# Altium schematic symbol library JST_Terminal.SchLib: 236 symbols (part 1 of 5)
Pins are listed as number, name and electrical type; pins without a type are passive.

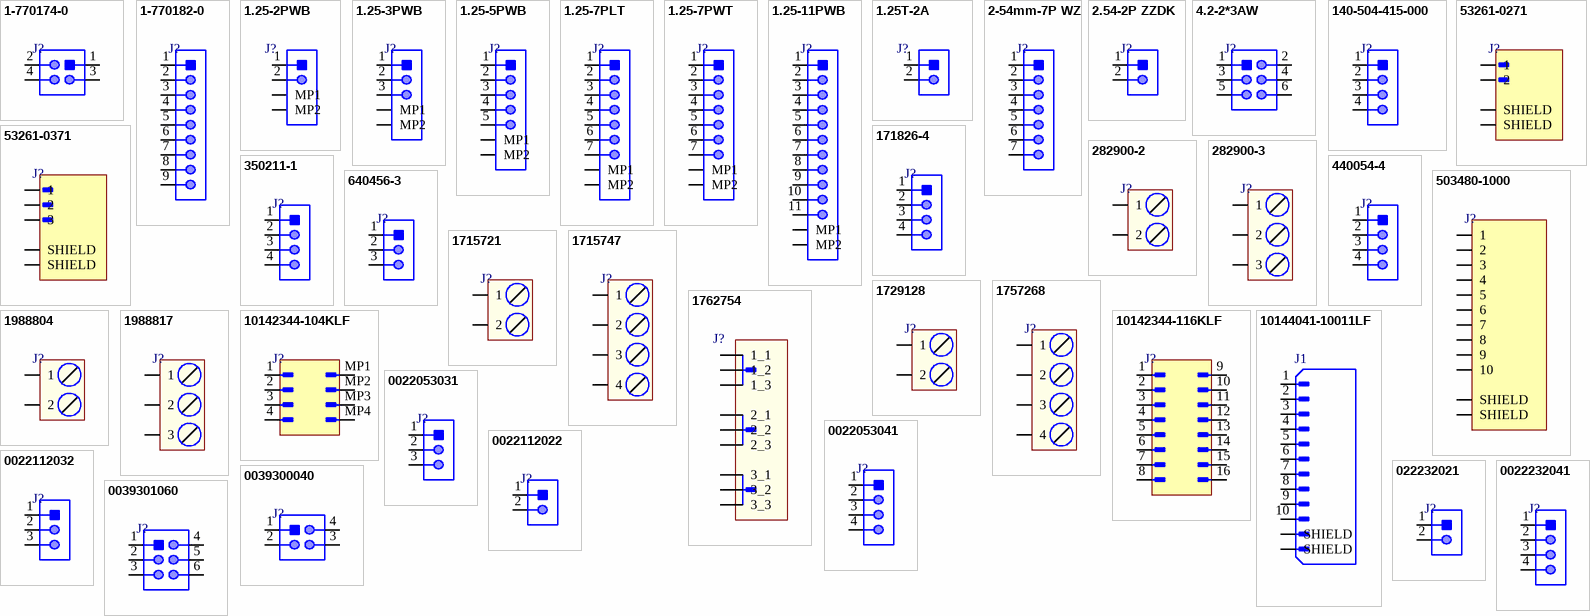
[diagram p0: symbols 1-770174-0 to 0039301060]

## 1-770174-0
designator J?
CONN HEADER VERT 4POS 4.14MM; Manufacturer: TE Connectivity; Manufacturer Part Number: 1-770174-0; Item Type: Power Connectors; Supplier: Future Electronics; Supplier Part Number: 3310547; RoHS: Yes; Stock: 890; Pricing: 1=0.995, 30=1.04, 40=0.945, 125=0.91, 300=0.95, 400=0.87, 1250=0.8 (USD); ComponentLink1URL: https://datasheet.ciiva.com/19460/746478-19460823.pdf?src-supplier=Jameco; ComponentLink1Description: https://datasheet.ciiva.com/19460/746478-19460823.pdf?src-supplier=Jameco; ComponentLink2URL: https://datasheet.ciiva.com/11755/0900766b80b8608c-11755178.pdf?src-supplier=Rs; ComponentLink2Description: https://datasheet.ciiva.com/11755/0900766b80b8608c-11755178.pdf?src-supplier=Rs; ComponentLink3URL: https://datasheet.ciiva.com/16324/eng-cs-82181-softshell-high-density-0508-16324224.pdf?src-supplier=Future+Electronics; ComponentLink3Description: https://datasheet.ciiva.com/16324/eng-cs-82181-softshell-high-density-0508-16324224.pdf?src-supplier=Future+Electronics; ComponentLink4URL: https://datasheet.ciiva.com/1111/eng-cd-770174-l2-1111782.pdf?src-supplier=Element14; ComponentLink4Description: https://datasheet.ciiva.com/1111/eng-cd-770174-l2-1111782.pdf?src-supplier=Element14; ComponentLink5URL: https://datasheet.ciiva.com/15173/getdatasheetpartid-47574-15173655.pdf?src-supplier=Verical; ComponentLink5Description: https://datasheet.ciiva.com/15173/getdatasheetpartid-47574-15173655.pdf?src-supplier=Verical; ComponentLink6URL: https://datasheet.ciiva.com/710/eng-cd-770174-m-710026.pdf?src-supplier=Digikey; ComponentLink6Description: https://datasheet.ciiva.com/710/eng-cd-770174-m-710026.pdf?src-supplier=Digikey; ComponentLink7URL: https://datasheet.ciiva.com/3126/eng-cs-82181-softshell-high-density-0408-3126092.pdf?src-supplier=Avnet; ComponentLink7Description: https://datasheet.ciiva.com/3126/eng-cs-82181-softshell-high-density-0408-3126092.pdf?src-supplier=Avnet; ComponentLink8URL: https://datasheet.ciiva.com/30189/eng-cs-82181-softshell-high-density-0508-30189644.pdf?src-supplier=Onlinecomponents.com; ComponentLink8Description: https://datasheet.ciiva.com/30189/eng-cs-82181-softshell-high-density-0508-30189644.pdf?src-supplier=Onlinecomponents.com; ComponentLink9URL: https://datasheet.ciiva.com/29266/745091-da-01-en-4-pol-mini-univ-mate-n-lok-stecksockel-29266107.pdf?src-supplier=Conrad; ComponentLink9Description: https://datasheet.ciiva.com/29266/745091-da-01-en-4-pol-mini-univ-mate-n-lok-stecksockel-29266107.pdf?src-supplier=Conrad
footprint 1-770174-0
pins: 1, 2, 3, 4

## 1-770182-0
designator J?
CONN HEADER VERT 9POS 4.14MM; Manufacturer: TE Connectivity; Manufacturer Part Number: 1-770182-0; Item Type: Power Connectors; Supplier: Future Electronics; LCSC Part Number: C3151769; RoHS: Yes; Stock: 4602; Pricing: 1=1.17, 30=1.14, 125=1.1, 300=1.08, 1250=1.03 (USD); ComponentLink1URL: https://datasheet.ciiva.com/714/eng-cd-770182-l1-714801.pdf?src-supplier=Farnell; ComponentLink1Description: https://datasheet.ciiva.com/714/eng-cd-770182-l1-714801.pdf?src-supplier=Farnell; ComponentLink2URL: https://datasheet.ciiva.com/11755/0900766b80b8608c-11755213.pdf?src-supplier=Rs; ComponentLink2Description: https://datasheet.ciiva.com/11755/0900766b80b8608c-11755213.pdf?src-supplier=Rs; ComponentLink3URL: https://datasheet.ciiva.com/16222/eng-cs-82181-softshell-high-density-0508-16222388.pdf?src-supplier=Future+Electronics; ComponentLink3Description: https://datasheet.ciiva.com/16222/eng-cs-82181-softshell-high-density-0508-16222388.pdf?src-supplier=Future+Electronics; ComponentLink4URL: https://datasheet.ciiva.com/19460/892141-19460018.pdf?src-supplier=Jameco; ComponentLink4Description: https://datasheet.ciiva.com/19460/892141-19460018.pdf?src-supplier=Jameco; ComponentLink5URL: https://datasheet.ciiva.com/41446/001231547-da-01-en-stiftsockel-180grad-1-0770182-0-41446360.pdf?src-supplier=Conrad; ComponentLink5Description: https://datasheet.ciiva.com/41446/001231547-da-01-en-stiftsockel-180grad-1-0770182-0-41446360.pdf?src-supplier=Conrad; ComponentLink6URL: https://datasheet.ciiva.com/14154/770182-eng-datasheet-14154870.pdf?src-supplier=Distrelec; ComponentLink6Description: https://datasheet.ciiva.com/14154/770182-eng-datasheet-14154870.pdf?src-supplier=Distrelec; ComponentLink7URL: https://datasheet.ciiva.com/1111/1648474-1111785.pdf?src-supplier=Element14; ComponentLink7Description: https://datasheet.ciiva.com/1111/1648474-1111785.pdf?src-supplier=Element14; ComponentLink8URL: https://datasheet.ciiva.com/15173/getdatasheetpartid-92655-15173754.pdf?src-supplier=Verical; ComponentLink8Description: https://datasheet.ciiva.com/15173/getdatasheetpartid-92655-15173754.pdf?src-supplier=Verical; ComponentLink9URL: https://datasheet.ciiva.com/3126/eng-cs-82181-softshell-high-density-0408-3126095.pdf?src-supplier=Avnet; ComponentLink9Description: https://datasheet.ciiva.com/3126/eng-cs-82181-softshell-high-density-0408-3126095.pdf?src-supplier=Avnet; ComponentLink10URL: https://datasheet.ciiva.com/30155/eng-cs-82181-softshell-high-density-0508-30155467.pdf?src-supplier=Onlinecomponents.com; ComponentLink10Description: https://datasheet.ciiva.com/30155/eng-cs-82181-softshell-high-density-0508-30155467.pdf?src-supplier=Onlinecomponents.com
footprint 1-770182-0
pins: 1, 2, 3, 4, 5, 6, 7, 8, 9

## 1.25-2PWB
designator J?
1x2P 1 1.25mm Male pin 2 -40℃~+85℃ Surface Mount SMD,P=1.25mm Wire To Board / Wire To Wire Connector ROHS; Manufacturer: DEALON; Manufacturer Part Number: 1.25-2PWB; Item Type: JST Connector; Package: SMD,P=1.25mm; LCSC Part Number: C2905009; ComponentLink1Description: LCSC; ComponentLink1URL: https://www.lcsc.com/product-detail/Wire-To-Board-Wire-To-Wire-Connector_DEALON-1-25-2PWB_C2905009.html
footprint 1.25-2PWB
pins: 1, 2, MP1, MP2

## 1.25-3PWB
designator J?
1x3P 1 1.25mm Male pin 3 -40℃~+85℃ Surface Mount SMD,P=1.25mm Wire To Board / Wire To Wire Connector ROHS; Manufacturer: DEALON; Manufacturer Part Number: 1.25-3PWB; Item Type: Right Angle JST; ComponentLink1Description: LCSC; ComponentLink1URL: https://www.lcsc.com/product-detail/Wire-To-Board-Wire-To-Wire-Connector_DEALON-1-25-3PWB_C2905010.html; Package: Custom; LCSC Part Number: C2905010
footprint 1.25-3PWB
pins: 1, 2, 3, MP1, MP2

## 1.25-5PWB
designator J?
1x5P 1 1.25mm Male pin 5 -25℃~+85℃ Surface Mount SMD,P=1.25mm Wire To Board / Wire To Wire Connector ROHS; Manufacturer: DEALON; Manufacturer Part Number: 1.25-5PWB; Item Type: JST Right Angle; Package: SMD,P=1.25mm; LCSC Part Number: C2905012; ComponentLink1Description: LCSC; ComponentLink1URL: https://www.lcsc.com/product-detail/Wire-To-Board-Wire-To-Wire-Connector_DEALON-1-25-5PWB_C2905012.html
footprint 1.25-5PWB
pins: 1, 2, 3, 4, 5, MP1, MP2

## 1.25-7PLT
designator J?
1x7P 7P 1 Tin 1.25mm 7 -25℃~+85℃ 1A Brass Standing paste SMD,P=1.25mm Wire To Board Connector ROHS; Manufacturer: FG; Manufacturer Part Number: 1.25-7PLT; Package: SMD,P=1.25mm; LCSC Part Number: C2763644; Item Type: Wire To Board Connector; ComponentLink1Description: LCSC; ComponentLink1URL: https://www.lcsc.com/product-detail/Wire-To-Board-Connector_FG-1-25-7PLT_C2763644.html?s_z=n_1.25-7P
footprint 1.25-7PLT
pins: 1, 2, 3, 4, 5, 6, 7, MP1, MP2

## 1.25-7PWT
designator J?
SMD,P=1.25mm,Surface Mount，Right Angle; Manufacturer: FG; Manufacturer Part Number: 1.25-7PWT; Item Type: Wire to Board Connector; Package: SMD,P=1.25mm,Surface Mount，Right Angle; LCSC Part Number: C2763635; ComponentLink1Description: LCSC; ComponentLink1URL: https://www.lcsc.com/product-detail/Wire-To-Board-Connector_FG-1-25-7PWT_C2763635.html?s_z=n_1.25-7P
footprint 1.25-7PWT
pins: 1, 2, 3, 4, 5, 6, 7, MP1, MP2

## 1.25-11PWB
designator J?
SMD,P=1.25mm Wire To Board / Wire To Wire Connector ROHS; Manufacturer: DEALON; Manufacturer Part Number: 1.25-11PWB; Item Type: Wire To Board Connector; Package: SMD,P=1.25mm; LCSC Part Number: C5140428; ComponentLink1Description: LCSC; ComponentLink1URL: https://www.lcsc.com/product-detail/Wire-To-Board-Wire-To-Wire-Connector_DEALON-1-25-11PWB_C5140428.html
footprint 1.25-11PWB
pins: 1, 2, 3, 4, 5, 6, 7, 8, 9, 10, 11, MP1, MP2

## 1.25T-2A
designator J?
0.049"(1.25mm) 2 MalePin Header MX1.25 Through Hole Wire To Board / Wire To Wire Connector ROHS; Manufacturer: BOOMELE; Manufacturer Part Number: 1.25T-2A; Package: Custom; ComponentLink1Description: LCSC; ComponentLink1URL: https://lcsc.com/product-detail/Wire-To-Board-Wire-To-Wire-Connector_BOOMELE-Boom-Precision-Elec-1-25T-2A_C10819.html; LCSC Part Number: C10819; Item Type: Header
footprint 1.25T-2A_
pins: 1, 2

## 2-54mm-7P WZ
designator J?
1x7P 7P 1 XH Tin 2.54mm 2.54mm 7 -25℃~+85℃ Brass 3A Bend-in Push-Pull,P=2.5mm Wire To Board Connector ROHS; Manufacturer: SHOU HAN; Manufacturer Part Number: 2.54mm-7P WZ; Package: Push-Pull,P=2.5mm; LCSC Part Number: C5368793; Item Type: Wire To Board Connector; ComponentLink1Description: LCSC; ComponentLink1URL: https://www.lcsc.com/product-detail/Wire-To-Board-Connector_SHOU-HAN-2-54mm-7P-WZ_C5368793.html
footprint 2.54mm-7P WZ
pins: 1, 2, 3, 4, 5, 6, 7

## 2.54-2P ZZDK
designator J?
1x2P 2P XH 1 2.5mm Tin 2 -25℃~+85℃ Brass 3A Direct Insert Plugin,P=2.5mm Wire To Board Connector ROHS; Manufacturer: SHOU HAN; Manufacturer Part Number: 2.54-2P ZZDK; Package: Plugin,P=2.5mm; LCSC Part Number: C18185649; Item Type: Wire To Board Connector; ComponentLink1Description: LCSC; ComponentLink1URL: https://www.lcsc.com/product-detail/Wire-To-Board-Connector_SHOU-HAN-2-54-2P-ZZDK_C18185649.html
footprint 2.54-2P ZZDK
pins: 1, 2

## 4.2-2*3AW
designator J?
4.2mm Wire To Board Connector ROHS; Manufacturer: BOOMELE; Manufacturer Part Number: 4.2-2*3AW; Package: Custom; LCSC Part Number: C35447; Item Type: Wire To Board Connector; ComponentLink1Description: LCSC; ComponentLink1URL: https://jlcpcb.com/partdetail/boomele_boom_Precision_elec-4_2_23AW/C35447
footprint 4.2-2*3AW
pins: 1, 2, 3, 4, 5, 6

## 140-504-415-000
designator J?
2.0MM PITCH CONNECTOR WITH 4 P.C; Manufacturer: EDAC; Manufacturer Part Number: 140-504-415-000; Item Type: JST Connector; Supplier 1: Digi-Key; RoHS: No; Category: Connectors; Stock 1: 4727; Pricing 1: 1=0.17000, 10=0.14200, 25=0.12600, 50=0.11760, 100=0.10920, 250=0.09660, 500=0.09240, 1000=0.07560, 2500=0.06930 (USD); Supplier Part Number 1: 151-140-504-415-000-ND
footprint 140-504-415-000_
pins: 1, 2, 3, 4

## 53261-0271
designator J?
CONN HEADER SMD R/A 2POS 1.25MM; Manufacturer: Molex; Manufacturer Part Number: 53261-0271; Item Type: Headers and Wire Housings; Plating: Tin; Contact Resistance: 20mR; Number of Contacts: 2; Voltage Rating: 125V; Current Rating: 1A; Insulation Resistance: 100MR; Gender: Male; Glow Wire Compliant: Non-compliant; Supplier: Arrow Electronics; LCSC Part Number: C177225; RoHS: Yes; Stock: 107200; Pricing: 1000=0.4221, 2000=0.4184, 3000=0.4147, 4000=0.411, 5000=0.4073, 10000=0.4035 (USD); Mounting Technology: Surface Mount; Contact Material: Bronze,Tin; Contact Plating: Tin; Color: Beige; Housing Material: Nylon; Contact Shape: Rectangular; Contact Finish - Mating: TIN; Insulation Material: Nylon; Insulation Color: Natural; Housing Color: Natural; Min Operating Temperature: -40°C; Max Operating Temperature: 85°C; Termination: Solder; Orientation: Right Angle; Number of Rows: 1; Voltage Rating (AC): 125V; Package Quantity: 1000; Packaging: Tape and Reel; Number of Positions: 2; Working Voltage: 125V; Number of Circuits: 2; Voltage Rating (DC): 125V; Connector Type: Header; Fastening Type: Detent; Series: PicoBlade; Contact Type: Blade Pin; Pitch: 1.25mm; Lead Pitch: 1.25mm; Depth: 5.2mm; Radiation Hardening: No; Lead Free: Lead Free; Flammability Rating: UL94 V-0; RoHS Compliant: Yes; Reach SVHC Compliant: Unknown; ComponentLink1URL: https://datasheet.ciiva.com/7167/1626147-7167496.pdf?src-supplier=Newark; ComponentLink1Description: https://datasheet.ciiva.com/7167/1626147-7167496.pdf?src-supplier=Newark; ComponentLink2URL: https://datasheet.ciiva.com/34303/1932547-34303342.pdf?src-supplier=Jameco; ComponentLink2Description: https://datasheet.ciiva.com/34303/1932547-34303342.pdf?src-supplier=Jameco; ComponentLink3URL: https://datasheet.ciiva.com/7920/1887027-7920826.pdf?src-supplier=Element14; ComponentLink3Description: https://datasheet.ciiva.com/7920/1887027-7920826.pdf?src-supplier=Element14; ComponentLink4URL: https://datasheet.ciiva.com/22683/1626147-22683562.pdf?src-supplier=Element14; ComponentLink4Description: https://datasheet.ciiva.com/22683/1626147-22683562.pdf?src-supplier=Element14; ComponentLink5URL: https://datasheet.ciiva.com/46393/1808526-46393547.pdf?src-supplier=Element14; ComponentLink5Description: https://datasheet.ciiva.com/46393/1808526-46393547.pdf?src-supplier=Element14
footprint 0532610271
pins: 1, 2, SH1 SHIELD, SH2 SHIELD

## 53261-0371
designator J?
CONN HEADER SMD R/A 3POS 1.25MM; Manufacturer: Molex; Manufacturer Part Number: 53261-0371; Manufacturer Series: 53261; Item Type: Headers and Wire Housings; Plating: Tin; Number of Positions: 3; Gender: Male; Contact Resistance: 20mR; Option: General Purpose; Current Rating: 1A; Voltage Rating: 125V; Mixed Contacts: No; Number of Rows Loaded: 1; Insulation Resistance: 100MR; Number of Circuits: 2; Glow Wire Compliant: Non-compliant; Supplier: Arrow Electronics; LCSC Part Number: C293630; RoHS: Yes; Stock: 442600; Pricing: 1600=0.3964 (USD); Mounting Technology: Surface Mount,Board; Contact Plating: Tin; Contact Material: Bronze,Tin; Color: Natural; Housing Color: Natural; Housing Material: Nylon; Min Operating Temperature: -40°C; Max Operating Temperature: 85°C; Termination: Solder; Orientation: Right Angle; Number of Rows: 1; Packaging: Tape and Reel; Number of Contacts: 3; Series: PicoBlade; Contact Type: Blade Pin; Contact Gender: Male; Mounting Style: STRAIGHT; Filter Feature: No; Voltage Rating (AC): 125V; Working Voltage: 125V; Voltage Rating (DC): 125V; Length: 8.9mm; Pitch: 1.25mm; Depth: 5.2mm; Radiation Hardening: No; Flammability Rating: UL94 V-0; MIL Conformance: No; DIN Conformance: No; IEC Conformance: No; RoHS Compliant: Yes; Reach SVHC Compliant: Unknown; Lead Free: Lead Free; ComponentLink1URL: https://datasheet.ciiva.com/3932/333250532610371-pcb-headers-3932824.pdf?src-supplier=Arrow+Electronics; ComponentLink1Description: https://datasheet.ciiva.com/3932/333250532610371-pcb-headers-3932824.pdf?src-supplier=Arrow+Electronics; ComponentLink2URL: https://datasheet.ciiva.com/34302/1302094-34302177.pdf?src-supplier=Jameco; ComponentLink2Description: https://datasheet.ciiva.com/34302/1302094-34302177.pdf?src-supplier=Jameco
footprint 53261-0371
pins: 1, 2, 3, SH1 SHIELD, SH2 SHIELD

## 171826-4
designator J?
CONN HEADER R/A 4POS 2.5MM; Manufacturer: TE Connectivity; Manufacturer Part Number: 171826-4; Number of Contacts: 4; Connector Type: Plug,Header,Pin; PCB Mount Retention: Without; PCB Mounting Orientation: Horizontal; Backwall/Post Interruptions: No (Without); Mating Alignment: Yes (With); Contact Current Rating: 3.5A; Plating Thickness: 0.8um; PCB Thickness: 0.063inch; Tail Length: 0.142inch; Approvals: UL; Item Type: R/A Header; Supplier 1: Digi-Key; Stock 1: 8314; Pricing 1: 1=0.65, 10=0.605, 100=0.4642, 500=0.40362, 1000=0.33298, 5000=0.29262, 10000=0.27244 (USD); Mount: Through Hole; Contact Plating: Copper,Tin; Contact Material: Brass; Color: Natural; Housing Color: Natural; Housing Material: Nylon; Contact Shape: Square; Insulation Material: Polyamide; Min Operating Temperature: -20°C; Max Operating Temperature: 95°C; Number of Rows: 1; Termination: Solder; Packaging: Bag; Package Quantity: 500; Number of Positions: 4; Orientation: Right Angle; Series: EI; Contact Type: Male Pin; Contact Retention: No (Without); Mating Retention: Yes (With); PCB Mount Alignment: No (Without); Strain Relief: No (Without); Contact Gender: Male; Current Rating: 3.5A; Length: 10mm; Width: 13.5mm; Height: 0.264inch; Pitch: 2.5mm; Contact Mating Length: 7.5mm; Depth: 13.5mm; Lead Pitch: 2.5mm; Radiation Hardening: No; Flammability Rating: UL94 V-0; RoHS Compliant: Yes; REACH SVHC: No SVHC; ComponentLink1URL: http://www.farnell.com/datasheets/1322337.pdf?src-supplier=Element14; ComponentLink1Description: http://www.farnell.com/datasheets/1322337.pdf?src-supplier=Element14; ComponentLink2URL: http://www.te.com/commerce/DocumentDelivery/DDEController?Action=srchrtrv&DocNm=171826&DocType=Customer+Drawing&DocLang=English&src-supplier=Digi-Key; ComponentLink2Description: http://www.te.com/commerce/DocumentDelivery/DDEController?Action=srchrtrv&DocNm=171826&DocType=Customer+Drawing&DocLang=English&src-supplier=Digi-Key; ComponentLink3URL: http://www.onlinecomponents.com/productFiles/mf-AMP/eng_cat_1242174_0698_10_.pdf?src-supplier=Onlinecomponents.com; ComponentLink3Description: http://www.onlinecomponents.com/productFiles/mf-AMP/eng_cat_1242174_0698_10_.pdf?src-supplier=Onlinecomponents.com; ComponentLink4URL: http://uk.rs-online.com/webdocs/0d92/0900766b80d92f49.pdf?src-supplier=RSComponents; ComponentLink4Description: http://uk.rs-online.com/webdocs/0d92/0900766b80d92f49.pdf?src-supplier=RSComponents; ComponentLink5URL: http://www.jameco.com/Jameco/Products/ProdDS/742320.pdf?src-supplier=Jameco; ComponentLink5Description: http://www.jameco.com/Jameco/Products/ProdDS/742320.pdf?src-supplier=Jameco; Supplier Part Number 1: A112643-ND; LCSC Part Number: C590635
footprint 171826-4_
pins: 1, 2, 3, 4

## 282900-2
designator J?
TERM BLK 2POS SIDE ENTRY 5MM PCB; Manufacturer: TE Connectivity; Manufacturer Part Number: 282900-2; Item Type: Terminal Blocks; Supplier: Digikey; Supplier Part Number: A113335-ND; RoHS: Yes; Stock: 978; Pricing: 1=1.06, 10=0.968, 25=0.9392, 50=0.9298, 100=0.863, 250=0.84872, 500=0.83944 (USD); ComponentLink1URL: https://datasheet.ciiva.com/824/eng-cd-282900-c6-824433.pdf?src-supplier=Digikey; ComponentLink1Description: https://datasheet.ciiva.com/824/eng-cd-282900-c6-824433.pdf?src-supplier=Digikey; ComponentLink2URL: https://datasheet.ciiva.com/18620/eng-cd-282900-c6-18620923.pdf?src-supplier=Digikey; ComponentLink2Description: https://datasheet.ciiva.com/18620/eng-cd-282900-c6-18620923.pdf?src-supplier=Digikey
footprint 282900-2
pins: 1, 2

## 282900-3
designator J?
TERM BLK 3POS SIDE ENTRY 5MM PCB; Manufacturer: TE Connectivity; Manufacturer Part Number: 282900-3; Item Type: Terminal Blocks; Supplier: Digikey; Supplier Part Number: A113336-ND; RoHS: Yes; Stock: 1182; Pricing: 1=2.07, 10=1.843, 25=1.8336, 50=1.815, 175=1.6556 (USD); ComponentLink1URL: https://datasheet.ciiva.com/824/eng-cd-282900-c6-824539.pdf?src-supplier=Digikey; ComponentLink1Description: https://datasheet.ciiva.com/824/eng-cd-282900-c6-824539.pdf?src-supplier=Digikey; ComponentLink2URL: https://datasheet.ciiva.com/18620/eng-cd-282900-c6-18620942.pdf?src-supplier=Digikey; ComponentLink2Description: https://datasheet.ciiva.com/18620/eng-cd-282900-c6-18620942.pdf?src-supplier=Digikey; ComponentLink3URL: https://datasheet.ciiva.com/9371/eng-cs-1308389-eurostyle-terminal-blocks-0607-9371157.pdf?src-supplier=Avnet; ComponentLink3Description: https://datasheet.ciiva.com/9371/eng-cs-1308389-eurostyle-terminal-blocks-0607-9371157.pdf?src-supplier=Avnet
footprint 282900-3
pins: 1, 2, 3

## 350211-1
designator J?
CONN HEADER VERT 4POS 5.08MM; Manufacturer: TE Connectivity; Manufacturer Part Number: 350211-1; Item Type: Power Connectors; Contact Style: 4753ConnectorType; Operating Supply Voltage: 250V; Supplier: Future Electronics; LCSC Part Number: C305826; RoHS: Yes; Stock: 3; Pricing: 1=0.795, 50=0.765, 150=0.735, 500=0.705, 1500=0.65 (USD); ComponentLink1URL: https://datasheet.ciiva.com/19454/421358-19454101.pdf?src-supplier=Jameco; ComponentLink1Description: https://datasheet.ciiva.com/19454/421358-19454101.pdf?src-supplier=Jameco; ComponentLink2URL: https://datasheet.ciiva.com/15173/getdatasheetpartid-92383-15173751.pdf?src-supplier=Verical; ComponentLink2Description: https://datasheet.ciiva.com/15173/getdatasheetpartid-92383-15173751.pdf?src-supplier=Verical; ComponentLink3URL: https://datasheet.ciiva.com/11755/0900766b800c5727-11755181.pdf?src-supplier=Rs; ComponentLink3Description: https://datasheet.ciiva.com/11755/0900766b800c5727-11755181.pdf?src-supplier=Rs; ComponentLink4URL: https://datasheet.ciiva.com/1442/1698836-1442676.pdf?src-supplier=Element14; ComponentLink4Description: https://datasheet.ciiva.com/1442/1698836-1442676.pdf?src-supplier=Element14; ComponentLink5URL: https://datasheet.ciiva.com/3126/eng-cs-82181-softshell-standard-density-0508-3126153.pdf?src-supplier=Avnet; ComponentLink5Description: https://datasheet.ciiva.com/3126/eng-cs-82181-softshell-standard-density-0508-3126153.pdf?src-supplier=Avnet; ComponentLink6URL: https://datasheet.ciiva.com/14154/cs-82181-soft-shell-eng-14154757.pdf?src-supplier=Distrelec; ComponentLink6Description: https://datasheet.ciiva.com/14154/cs-82181-soft-shell-eng-14154757.pdf?src-supplier=Distrelec; ComponentLink7URL: https://datasheet.ciiva.com/30161/eng-cs-82181-softshell-standard-density-0508-30161246.pdf?src-supplier=Onlinecomponents.com; ComponentLink7Description: https://datasheet.ciiva.com/30161/eng-cs-82181-softshell-standard-density-0508-30161246.pdf?src-supplier=Onlinecomponents.com
footprint 350211-1
pins: 1, 2, 3, 4

## 440054-4
designator J?
CONN HEADER VERT 4POS 2MM; Manufacturer: TE Connectivity; Manufacturer Part Number: 440054-4; Item Type: JST Connector; Supplier 1: Rs; RoHS: Yes; Category: Headers and Wire Housings; Stock 1: 3450; Pricing 1: 10=0.02240 (GBP); ComponentLink1URL: https://datasheet.ciiva.com/30492/0900766b80f980a5-30492744.pdf?src-supplier=Rs; ComponentLink1Description: https://datasheet.ciiva.com/30492/0900766b80f980a5-30492744.pdf?src-supplier=Rs; ComponentLink2URL: https://datasheet.ciiva.com/34397/4400544-34397340.pdf?src-supplier=Onlinecomponents.com; ComponentLink2Description: https://datasheet.ciiva.com/34397/4400544-34397340.pdf?src-supplier=Onlinecomponents.com; ComponentLink3URL: https://datasheet.ciiva.com/732/eng-cd-440054-e2-732490.pdf?src-supplier=Digi-Key; ComponentLink3Description: https://datasheet.ciiva.com/732/eng-cd-440054-e2-732490.pdf?src-supplier=Digi-Key; Supplier Part Number 1: 7202004P; LCSC Part Number: C574333
footprint 440054-4
pins: 1, 2, 3, 4

## 503480-1000
designator J?
CONN FFC FPC 10POS 0.5MM R/A; Manufacturer: Molex; Manufacturer Part Number: 503480-1000; Item Type: FFC / FPC; Actuator Material: Nylon,Glass,Polyamide; Actuator Color: Black; Plating: 157ConductorMaterial; Voltage Rating (AC): 50V; Current Rating: 500mA; Number of Positions: 10; Gender: Receptacle; Wire/Cable Type: Straight; Stackable: No; Supplier: Mouser; Supplier Part Number: 538-503480-1000; RoHS: Yes; Stock: 11378; Pricing: 1=0.99, 10=0.737, 50=0.737, 100=0.64, 1000=0.559, 10000=0.465 (USD); Housing Color: White; Housing Material: Polymer; Material: 150ConductorMaterial; Contact Material: Bronze; Contact Plating: Gold; Min Operating Temperature: -40°C; Max Operating Temperature: 85°C; Package Quantity: 3000; Number of Rows: 1; Voltage Rating: 50V; Packaging: Tape and Reel; Termination: Solder; Max Voltage Rating (AC): 50V; Number of Contacts: 10; Max Voltage Rating (DC): 50V; Orientation: Right Angle; Series: BackFlip, Easy-On 503480; Number of Circuits: 10; Mating Cycles: 10; Length: 6.7mm; Pitch: 0.5mm; Depth: 3.6mm; Radiation Hardening: No; Flammability Rating: UL94 V-0; Reach SVHC Compliant: Unknown; Halogen Free: 5696HalogenFree; ELV: 5681ELVCompliant; ComponentLink1URL: https://datasheet.ciiva.com/26916/getdatasheetpartid-735332-26916946.pdf?src-supplier=Verical; ComponentLink1Description: https://datasheet.ciiva.com/26916/getdatasheetpartid-735332-26916946.pdf?src-supplier=Verical; ComponentLink2URL: https://datasheet.ciiva.com/5137/5034801000-ffc-fpc-connectors-179433-5137762.pdf?src-supplier=Mouser; ComponentLink2Description: https://datasheet.ciiva.com/5137/5034801000-ffc-fpc-connectors-179433-5137762.pdf?src-supplier=Mouser; ComponentLink3URL: https://datasheet.ciiva.com/671/5034801000-sd-671179.pdf?src-supplier=Digikey; ComponentLink3Description: https://datasheet.ciiva.com/671/5034801000-sd-671179.pdf?src-supplier=Digikey
footprint 5034801000
pins: 1, 2, 3, 4, 5, 6, 7, 8, 9, 10, S1 SHIELD, S2 SHIELD

## 640456-3
designator J?
CONN HEADER VERT 3POS 2.54MM; Manufacturer: TE Connectivity; Manufacturer Part Number: 640456-3; Number of Positions: 3; Voltage Rating: 250V; Connector Type: Connector,Pin,Plug,Header; Connector System: Wire-to-Board; Contact Retention: No (Without); Contact Current Rating: 5A; PCB Mount Retention: Without; Contact Resistance: 6mR; PCB Mounting Orientation: Vertical; Gender: Male; Contact Style: Straight; Circuit Application: Signal; Mating Connector Lock: Yes (With); PCB Thickness: 0.063inch; Plating Thickness: 3.81um; Contact Post Length: 3.56mm; Tail Length: 0.14inch; Approvals: CSA; Supplier 1: RSComponents; RoHS: Yes; Category: JST Connectors; Stock 1: 8977; Pricing 1: 250=0.08100, 1000=0.07000, 5000=0.05800, 10000=0.05400 (GBP); Mount: Through Hole; Contact Plating: Tin; Housing Color: Natural; Housing Material: Polyester; Contact Material: Copper Alloy; Color: Beige,White; Contact Shape: Square; Contact Finish - Mating: TIN; Insulation Material: Thermoplastic; Insulation Color: Natural; Min Operating Temperature: -67°C; Max Operating Temperature: 221°C; Number of Rows: 1; Packaging: Bulk; Package Quantity: 5000; Termination: Solder; Number of Contacts: 3; Orientation: Straight; Max Voltage Rating (AC): 250V; Contact Gender: Male; Mating Alignment: No (Without); Mating Retention: No (Without); PCB Mount Alignment: No (Without); Sealable: No (Without); Current Rating: 5A; Strain Relief: No (Without); Backwall/Post Interruptions: No (Without); Shrouded: No (Without); Fastening Type: Friction; Voltage Rating (AC): 250V; Series: MTA-100; Contact Type: Male Pin; Panel Mount Retention: No (Without); Mounting Ears: No (Without); Length: 0.4inch; Height: 7.87mm; Pitch: 2.54mm; Depth: 5.72mm; Contact Mating Length: 7.49mm; Radiation Hardening: No; Flammability Rating: UL94 V-0; REACH SVHC: Unknown; Lead Free: Lead Free; ELV: Compliant; RoHS Compliant: Yes; ComponentLink1URL: https://datasheet.ciiva.com/11746/0900766b80027008-11746172.pdf?src-supplier=RSComponents; ComponentLink1Description: https://datasheet.ciiva.com/11746/0900766b80027008-11746172.pdf?src-supplier=RSComponents; ComponentLink2URL: https://datasheet.ciiva.com/6005/1712135-6005440.pdf?src-supplier=Farnell; ComponentLink2Description: https://datasheet.ciiva.com/6005/1712135-6005440.pdf?src-supplier=Farnell; ComponentLink3URL: https://datasheet.ciiva.com/19474/613940-19474164.pdf?src-supplier=Jameco; ComponentLink3Description: https://datasheet.ciiva.com/19474/613940-19474164.pdf?src-supplier=Jameco; ComponentLink4URL: https://datasheet.ciiva.com/16456/eng-ds-82056-mta-0608-16456886.pdf?src-supplier=Future+Electronics; ComponentLink4Description: https://datasheet.ciiva.com/16456/eng-ds-82056-mta-0608-16456886.pdf?src-supplier=Future+Electronics; ComponentLink5URL: https://datasheet.ciiva.com/14156/04384301-14156821.pdf?src-supplier=Distrelec; ComponentLink5Description: https://datasheet.ciiva.com/14156/04384301-14156821.pdf?src-supplier=Distrelec; ComponentLink6URL: https://datasheet.ciiva.com/16656/eng-ds-82056-mta-0608-16656523.pdf?src-supplier=Avnet+Europe; ComponentLink6Description: https://datasheet.ciiva.com/16656/eng-ds-82056-mta-0608-16656523.pdf?src-supplier=Avnet+Europe; ComponentLink7URL: https://datasheet.ciiva.com/30127/8852eng-ds-82056-mta-0608-30127480.pdf?src-supplier=Onlinecomponents.com; ComponentLink7Description: https://datasheet.ciiva.com/30127/8852eng-ds-82056-mta-0608-30127480.pdf?src-supplier=Onlinecomponents.com; ComponentLink8URL: https://datasheet.ciiva.com/14637/70083643-14637750.pdf?src-supplier=Allied+Electronics; ComponentLink8Description: https://datasheet.ciiva.com/14637/70083643-14637750.pdf?src-supplier=Allied+Electronics; ComponentLink9URL: https://datasheet.ciiva.com/7128/eng-ds-82056-mta-0608-7128744.pdf?src-supplier=Newark; ComponentLink9Description: https://datasheet.ciiva.com/7128/eng-ds-82056-mta-0608-7128744.pdf?src-supplier=Newark; ComponentLink10URL: https://datasheet.ciiva.com/709/eng-cd-640456-w2-709688.pdf?src-supplier=Digi-Key; ComponentLink10Description: https://datasheet.ciiva.com/709/eng-cd-640456-w2-709688.pdf?src-supplier=Digi-Key; Supplier Part Number 1: 1320361P; LCSC Part Number: C86503; Item Type: Header
footprint 640456-3_
pins: 1, 2, 3

## 1715721
designator J?
TERM BLK 2P SIDE ENT 5.08MM PCB; Manufacturer: Phoenix Contact; Manufacturer Part Number: 1715721; Item Type: Terminal Blocks; Supplier: Digikey; LCSC Part Number: C480516; RoHS: Yes; Stock: 13160; Pricing: 1=0.94 (USD); ComponentLink1URL: https://datasheet.ciiva.com/1120/1697161-1120393.pdf?src-supplier=Farnell; ComponentLink1Description: https://datasheet.ciiva.com/1120/1697161-1120393.pdf?src-supplier=Farnell; ComponentLink2URL: https://datasheet.ciiva.com/832/1715721-832095.pdf?src-supplier=Digikey; ComponentLink2Description: https://datasheet.ciiva.com/832/1715721-832095.pdf?src-supplier=Digikey; ComponentLink3URL: https://datasheet.ciiva.com/15169/getdatasheetpartid-212174-15169929.pdf?src-supplier=Verical; ComponentLink3Description: https://datasheet.ciiva.com/15169/getdatasheetpartid-212174-15169929.pdf?src-supplier=Verical; ComponentLink4URL: https://datasheet.ciiva.com/16046/1715721-16046034.pdf?src-supplier=Onlinecomponents.com; ComponentLink4Description: https://datasheet.ciiva.com/16046/1715721-16046034.pdf?src-supplier=Onlinecomponents.com
footprint 1715721
pins: 1, 2

## 1715747
designator J?
TERM BLK 4P SIDE ENT 5.08MM PCB; Manufacturer: Phoenix Contact; Manufacturer Part Number: 1715747; Item Type: Terminal Blocks; Supplier: Digikey; Supplier Part Number: 277-1265-ND; RoHS: Yes; Stock: 3401; Pricing: 1=2.39, 10=2.287, 50=2.188, 100=2.1282, 250=1.989, 500=1.82988, 1000=1.79562 (USD); ComponentLink1URL: https://datasheet.ciiva.com/16071/1715747-16071928.pdf?src-supplier=Onlinecomponents.com; ComponentLink1Description: https://datasheet.ciiva.com/16071/1715747-16071928.pdf?src-supplier=Onlinecomponents.com; ComponentLink2URL: https://datasheet.ciiva.com/23596/100425-23596240.pdf?src-supplier=Newark; ComponentLink2Description: https://datasheet.ciiva.com/23596/100425-23596240.pdf?src-supplier=Newark; ComponentLink3URL: https://datasheet.ciiva.com/15169/getdatasheetpartid-227081-15169962.pdf?src-supplier=Verical; ComponentLink3Description: https://datasheet.ciiva.com/15169/getdatasheetpartid-227081-15169962.pdf?src-supplier=Verical; ComponentLink4URL: https://datasheet.ciiva.com/11757/0900766b811d7317-11757713.pdf?src-supplier=Rs; ComponentLink4Description: https://datasheet.ciiva.com/11757/0900766b811d7317-11757713.pdf?src-supplier=Rs; ComponentLink5URL: https://datasheet.ciiva.com/824/1715747-824336.pdf?src-supplier=Digikey; ComponentLink5Description: https://datasheet.ciiva.com/824/1715747-824336.pdf?src-supplier=Digikey; ComponentLink6URL: https://datasheet.ciiva.com/1120/1731555-1120440.pdf?src-supplier=Farnell; ComponentLink6Description: https://datasheet.ciiva.com/1120/1731555-1120440.pdf?src-supplier=Farnell; ComponentLink7URL: https://datasheet.ciiva.com/1118/1731555-1118428.pdf?src-supplier=Element14; ComponentLink7Description: https://datasheet.ciiva.com/1118/1731555-1118428.pdf?src-supplier=Element14; ComponentLink8URL: https://datasheet.ciiva.com/33106/1715747-33106010.pdf?src-supplier=Today+Components; ComponentLink8Description: https://datasheet.ciiva.com/33106/1715747-33106010.pdf?src-supplier=Today+Components; ComponentLink9URL: https://datasheet.ciiva.com/29218/743477-da-01-en-printklemmenblock-mkds-1-5-4-5-08-29218070.pdf?src-supplier=Conrad; ComponentLink9Description: https://datasheet.ciiva.com/29218/743477-da-01-en-printklemmenblock-mkds-1-5-4-5-08-29218070.pdf?src-supplier=Conrad
footprint 1715747
pins: 1, 2, 3, 4

## 1729128
designator J?
TERM BLK 2P SIDE ENT 5.08MM PCB; Manufacturer: Phoenix Contact; Manufacturer Part Number: 1729128; Item Type: Terminal Blocks; Voltage Rating: 400V; Number of Poles: 2; Current Rating: 13.5A; Number of Levels: 1; Current: 10A; Voltage: 300V; Connector Type: Screw; Wire Gauge (Max): 26AWG; Wire Gauge (Min): 14AWG; Approvals: UL,CSA; Supplier: Digikey; Supplier Part Number: 277-1247-ND; RoHS: Yes; Stock: 33086; Pricing: 1=0.77 (USD); Mounting Technology: Through Hole; Pins: 2; Color: Green; Housing Color: Green; Housing Material: Polyamide; Weight: 0.069842oz; Insulation Material: Nylon; Contact Material: Tin; Package Quantity: 50; Packaging: Bulk; Termination: Solder; Series: MKDSN; Number of Positions Per Level: 2; Number of Positions: 2; Orientation: Straight; Max Current Rating: 13.5A; Number of Rows: 1; Max Supply Voltage: 400V; Number of Contacts: 2; Number of Circuits: 2; Length: 8.1mm; Width: 13.5mm; Height: 13.5mm; Depth: 8.1mm; Pitch: 5.08mm; Wire/Cable Gauge: 26AWG; Radiation Hardening: No; RoHS Compliant: Yes; Lead Free: Lead Free; Flammability Rating: UL94 V-0; Reach SVHC Compliant: No; ComponentLink1URL: https://datasheet.ciiva.com/16046/1729128-16046181.pdf?src-supplier=Onlinecomponents.com; ComponentLink1Description: https://datasheet.ciiva.com/16046/1729128-16046181.pdf?src-supplier=Onlinecomponents.com; ComponentLink2URL: https://datasheet.ciiva.com/15169/getdatasheetpartid-199310-15169845.pdf?src-supplier=Verical; ComponentLink2Description: https://datasheet.ciiva.com/15169/getdatasheetpartid-199310-15169845.pdf?src-supplier=Verical; ComponentLink3URL: https://datasheet.ciiva.com/823/1729128-823779.pdf?src-supplier=Digikey; ComponentLink3Description: https://datasheet.ciiva.com/823/1729128-823779.pdf?src-supplier=Digikey; ComponentLink4URL: https://datasheet.ciiva.com/14607/70054405-14607157.pdf?src-supplier=Allied+Electronics; ComponentLink4Description: https://datasheet.ciiva.com/14607/70054405-14607157.pdf?src-supplier=Allied+Electronics; ComponentLink5URL: https://datasheet.ciiva.com/29218/743664-da-01-en-printklemmenblock-mkdsn-1-5-2-5-08-29218154.pdf?src-supplier=Conrad; ComponentLink5Description: https://datasheet.ciiva.com/29218/743664-da-01-en-printklemmenblock-mkdsn-1-5-2-5-08-29218154.pdf?src-supplier=Conrad
footprint 1729128
pins: 1, 2

## 1757268
designator J?
TERM BLOCK HDR 4POS 90DEG 5.08MM; Manufacturer: Phoenix Contact; Manufacturer Part Number: 1757268; Item Type: Terminal Blocks; Voltage Rating (DC): 250V; Gender: 29Gender; Supplier: Digikey; LCSC Part Number: C90076; RoHS: Yes; Stock: 18354; Pricing: 1=1.49, 10=1.003, 25=0.9588 (USD); Housing Color: 49Colour; Max Operating Temperature: 70°C; Lead Free: 5697LeadFree; ComponentLink1URL: https://datasheet.ciiva.com/15197/getdatasheetpartid-176352-15197330.pdf?src-supplier=Verical; ComponentLink1Description: https://datasheet.ciiva.com/15197/getdatasheetpartid-176352-15197330.pdf?src-supplier=Verical; ComponentLink2URL: https://datasheet.ciiva.com/795/1757268-795434.pdf?src-supplier=Digikey; ComponentLink2Description: https://datasheet.ciiva.com/795/1757268-795434.pdf?src-supplier=Digikey; ComponentLink3URL: https://datasheet.ciiva.com/7630/1697153-7630841.pdf?src-supplier=Element14; ComponentLink3Description: https://datasheet.ciiva.com/7630/1697153-7630841.pdf?src-supplier=Element14; ComponentLink4URL: https://datasheet.ciiva.com/16096/1757268-16096406.pdf?src-supplier=Onlinecomponents.com; ComponentLink4Description: https://datasheet.ciiva.com/16096/1757268-16096406.pdf?src-supplier=Onlinecomponents.com; ComponentLink5URL: https://datasheet.ciiva.com/29210/569323-da-01-en-grundgehaeuse-1757268-250-st-29210575.pdf?src-supplier=Conrad; ComponentLink5Description: https://datasheet.ciiva.com/29210/569323-da-01-en-grundgehaeuse-1757268-250-st-29210575.pdf?src-supplier=Conrad; ComponentLink6URL: https://datasheet.ciiva.com/16703/70054631-16703596.pdf?src-supplier=Allied+Electronics; ComponentLink6Description: https://datasheet.ciiva.com/16703/70054631-16703596.pdf?src-supplier=Allied+Electronics
footprint 1757268
pins: 1, 2, 3, 4

## 1762754
designator J?
TERM BLOCK HDR 3POS 90DEG 15MM; Manufacturer: Phoenix Contact; Manufacturer Part Number: 1762754; Item Type: Terminal Blocks; Supplier: Mouser; Supplier Part Number: 651-1762754; RoHS: Yes; Stock: 24; Pricing: 1=16.29, 10=15.93, 50=11.86, 100=11.86, 1000=11.86, 10000=11.86 (USD); ComponentLink1URL: https://datasheet.ciiva.com/818/1762754-818032.pdf?src-supplier=Digikey; ComponentLink1Description: https://datasheet.ciiva.com/818/1762754-818032.pdf?src-supplier=Digikey
footprint 1762754
pins: 1_1, 1_2, 1_3, 2_1, 2_2, 2_3, 3_1, 3_2, 3_3

## 1988804
designator J?
TERM BLOCK 2POS 45DEG 5MM PCB; Manufacturer: Phoenix Contact; Manufacturer Part Number: 1988804; Item Type: Screw terminal; Supplier: Digi-Key; Supplier Part Number: 277-1764-ND; RoHS: Yes; Category: Terminal Blocks; Stock: 4146; Pricing: 1=0.67, 10=0.638, 50=0.6098, 100=0.5932, 250=0.5544, 500=0.51004, 1000=0.47123, 2500=0.4505, 5000=0.429 (USD); ComponentLink1URL: https://datasheet.ciiva.com/26824/getdatasheetpartid-245870-26824102.pdf?src-supplier=Verical; ComponentLink1Description: https://datasheet.ciiva.com/26824/getdatasheetpartid-245870-26824102.pdf?src-supplier=Verical; ComponentLink2URL: https://datasheet.ciiva.com/16051/1988804-16051345.pdf?src-supplier=Onlinecomponents.com; ComponentLink2Description: https://datasheet.ciiva.com/16051/1988804-16051345.pdf?src-supplier=Onlinecomponents.com; ComponentLink3URL: https://datasheet.ciiva.com/823/combiconcompact5-0mmseries-823751.pdf?src-supplier=Digi-Key; ComponentLink3Description: https://datasheet.ciiva.com/823/combiconcompact5-0mmseries-823751.pdf?src-supplier=Digi-Key; LCSC Part Number: C7168402
footprint 1988804
pins: 1, 2

## 1988817
designator J?
TERM BLOCK 3POS 45DEG 5MM PCB; Manufacturer: Phoenix Contact; Manufacturer Part Number: 1988817; Item Type: Screw terminal; Supplier: Arrow Electronics; Supplier Part Number: 1988817; RoHS: Yes; Category: Terminal Blocks; Stock: 2; Pricing: 1=0.4959 (USD); ComponentLink1URL: https://datasheet.ciiva.com/16051/1988817-16051348.pdf?src-supplier=Onlinecomponents.com; ComponentLink1Description: https://datasheet.ciiva.com/16051/1988817-16051348.pdf?src-supplier=Onlinecomponents.com; ComponentLink2URL: https://datasheet.ciiva.com/823/combiconcompact5-0mmseries-823762.pdf?src-supplier=Digi-Key; ComponentLink2Description: https://datasheet.ciiva.com/823/combiconcompact5-0mmseries-823762.pdf?src-supplier=Digi-Key; ComponentLink3URL: https://datasheet.ciiva.com/29222/569647-da-01-en-printklemme-1988817-250-st-29222794.pdf?src-supplier=Conrad; ComponentLink3Description: https://datasheet.ciiva.com/29222/569647-da-01-en-printklemme-1988817-250-st-29222794.pdf?src-supplier=Conrad; LCSC Part Number: C5157934
footprint 1988817
pins: 1, 2, 3

## 10142344-104KLF
designator J?
CONN MICROSPACE HDR-ASSY STG T; Manufacturer: Amphenol ICC / FCI; Manufacturer Part Number: 10142344-104KLF; Item Type: Connectors; Supplier: Digikey; Supplier Part Number: 609-10142344-104KLFCT-ND; RoHS: No; Stock: 2654; Pricing: 1=1.93, 10=1.46, 25=1.3172, 50=1.2254, 100=1.1341 (USD); ComponentLink1URL: https://datasheet.octopart.com/10142344-104KLF-Amphenol-Communications-Solutions-datasheet-137746511.pdf?src-supplier=TME; ComponentLink1Description: https://datasheet.octopart.com/10142344-104KLF-Amphenol-Communications-Solutions-datasheet-137746511.pdf?src-supplier=TME
footprint 10142344-104KLF
pins: 1, 2, 3, 4, MP1, MP2, MP3, MP4

## 10142344-116KLF
designator J?
Connector Shrouded Header 16 Position Surface Mount T/R; Manufacturer: Amphenol ICC / FCI; Manufacturer Part Number: 10142344-116KLF; Supplier: Mouser; LCSC Part Number: C5155180; RoHS: No; Item Type: Connectors; Stock: 469; Pricing: 1=2.76, 10=2.17, 50=2.17, 100=2.03, 1000=1.35, 10000=1.21 (USD)
footprint 10142344-116KLF
pins: 1, 2, 3, 4, 5, 6, 7, 8, 9, 10, 11, 12, 13, 14, 15, 16

## 10144041-10011LF
designator J1
CONN HEADER SMD R/A 10POS 0.8MM; Manufacturer: Amphenol ICC (FCI); Manufacturer Part Number: 10144041-10011LF; Item Type: Right Angle Connector; Package: Custom
footprint 10144041-10011LF
pins: 1, 2, 3, 4, 5, 6, 7, 8, 9, 10, S1 SHIELD, S2 SHIELD

## 0022053031
designator J?
CONN HEADER R/A 3POS 2.54MM; Manufacturer: Molex; Manufacturer Part Number: 0022053031; Item Type: Headers, Male Pins; Supplier: Mouser; Supplier Part Number: 538-22-05-3031; RoHS: Yes; Stock: 22393; Pricing: 1=0.48, 10=0.423, 50=0.423, 100=0.349, 1000=0.25, 10000=0.205 (USD)
footprint 0022053031
pins: 1, 2, 3

## 0022053041
designator J?
CONN HEADER R/A 4POS 2.54MM; Manufacturer: Molex; Manufacturer Part Number: 0022053041; Item Type: Wire To Board Connector; Supplier: Mouser; Supplier Part Number: 538-22-05-3041; RoHS: Yes; Stock: 11241; Pricing: 1=0.53, 10=0.383, 50=0.383, 100=0.327, 1000=0.273, 10000=0.266 (USD); ComponentLink1URL: https://www.molex.com/pdm_docs/sd/022053041_sd.pdf?src-supplier=Digikey; ComponentLink1Description: https://www.molex.com/pdm_docs/sd/022053041_sd.pdf?src-supplier=Digikey; LCSC Part Number: C98739
footprint 0022053041
pins: 1, 2, 3, 4

## 0022112022
designator J?
CONN HEADER VERT 2POS 2.54MM; Manufacturer: Molex; Manufacturer Part Number: 0022112022; Item Type: Headers, Male Pins; Supplier: Mouser; Supplier Part Number: 538-22-11-2022; RoHS: Yes; Stock: 67872; Pricing: 1=0.4, 10=0.274, 50=0.274, 100=0.216, 1000=0.177, 10000=0.169 (USD); ComponentLink1URL: https://www.molex.com/pdm_docs/sd/022112022_sd.pdf?src-supplier=Digikey; ComponentLink1Description: https://www.molex.com/pdm_docs/sd/022112022_sd.pdf?src-supplier=Digikey; LCSC Part Number: C505162
footprint 0022112022
pins: 1, 2

## 0022112032
designator J?
CONN HEADER VERT 3POS 2.54MM; Manufacturer: Molex; Manufacturer Part Number: 0022112032; Item Type: Headers, Male Pins; Supplier: Mouser; Supplier Part Number: 538-22-11-2032; RoHS: Yes; Stock: 32037; Pricing: 1=0.68, 10=0.599, 50=0.599, 100=0.494, 1000=0.354, 10000=0.311 (USD); ComponentLink1URL: https://www.molex.com/pdm_docs/sd/022112032_sd.pdf?src-supplier=Digikey; ComponentLink1Description: https://www.molex.com/pdm_docs/sd/022112032_sd.pdf?src-supplier=Digikey; LCSC Part Number: C505163
footprint 0022112032
pins: 1, 2, 3

## 022232021
designator J?
CONN HEADER VERT 2POS 2.54MM; Manufacturer: Molex; Manufacturer Part Number: 022232021; Supplier: Mouser; Supplier Part Number: 538-22-23-2021; RoHS: No; Category: Uncategorized; Stock: 51848; Pricing: 1=0.21, 10=0.127, 50=0.127, 100=0.096, 1000=0.086, 10000=0.073 (USD)
footprint 022232021
pins: 1, 2

## 0022232041
designator J?
CONN HEADER VERT 4POS 2.54MM; Manufacturer: Molex; Manufacturer Part Number: 0022232041; Item Type: JST Connector; Supplier: Mouser; Supplier Part Number: 538-22-23-2041; RoHS: Yes; Stock: 47281; Pricing: 1=0.33, 10=0.215, 50=0.215, 100=0.16, 1000=0.145, 10000=0.13 (USD)
footprint 0022232041
pins: 1, 2, 3, 4

## 0039300040
designator J?
CONN HEADER R/A 4POS 4.2MM; Manufacturer: Molex; Item Type: Headers and Wire Housings; Supplier: Mouser; Supplier Part Number: 538-39-30-0040; Manufacturer Part Number: 39-30-0040; RoHS: Yes; Stock: 15606; Pricing: 1=0.89, 10=0.754, 50=0.754, 100=0.681, 1000=0.608, 10000=0.53 (USD); ComponentLink1URL: https://datasheet.ciiva.com/5149/0039300040-pcb-headers-140142-5149121.pdf?src-supplier=Mouser; ComponentLink1Description: https://datasheet.ciiva.com/5149/0039300040-pcb-headers-140142-5149121.pdf?src-supplier=Mouser; ComponentLink2URL: https://datasheet.ciiva.com/11753/0900766b80d5d5b2-11753001.pdf?src-supplier=Rs; ComponentLink2Description: https://datasheet.ciiva.com/11753/0900766b80d5d5b2-11753001.pdf?src-supplier=Rs; ComponentLink3URL: https://datasheet.ciiva.com/26921/getdatasheetpartid-168591-26921980.pdf?src-supplier=Verical; ComponentLink3Description: https://datasheet.ciiva.com/26921/getdatasheetpartid-168591-26921980.pdf?src-supplier=Verical; ComponentLink4URL: https://datasheet.ciiva.com/30077/32250039300040-pcb-headers-30077452.pdf?src-supplier=Onlinecomponents.com; ComponentLink4Description: https://datasheet.ciiva.com/30077/32250039300040-pcb-headers-30077452.pdf?src-supplier=Onlinecomponents.com; ComponentLink5URL: https://datasheet.ciiva.com/17018/70266946-17018007.pdf?src-supplier=Allied+Electronics; ComponentLink5Description: https://datasheet.ciiva.com/17018/70266946-17018007.pdf?src-supplier=Allied+Electronics; ComponentLink6URL: https://datasheet.ciiva.com/1443/1707493-1443179.pdf?src-supplier=Element14; ComponentLink6Description: https://datasheet.ciiva.com/1443/1707493-1443179.pdf?src-supplier=Element14; LCSC Part Number: C234187
footprint 0039300040
pins: 1, 2, 3, 4

## 0039301060
designator J?
CONN HEADER R/A 6POS 4.2MM; Manufacturer: Molex; Manufacturer Part Number: 0039301060; Item Type: Headers, Male Pins; Supplier: Mouser; Supplier Part Number: 538-39-30-1060; RoHS: Yes; Stock: 9943; Pricing: 1=1.12, 10=0.953, 50=0.953, 100=0.856, 1000=0.7, 10000=0.545 (USD)
footprint 0039301060
pins: 1, 2, 3, 4, 5, 6

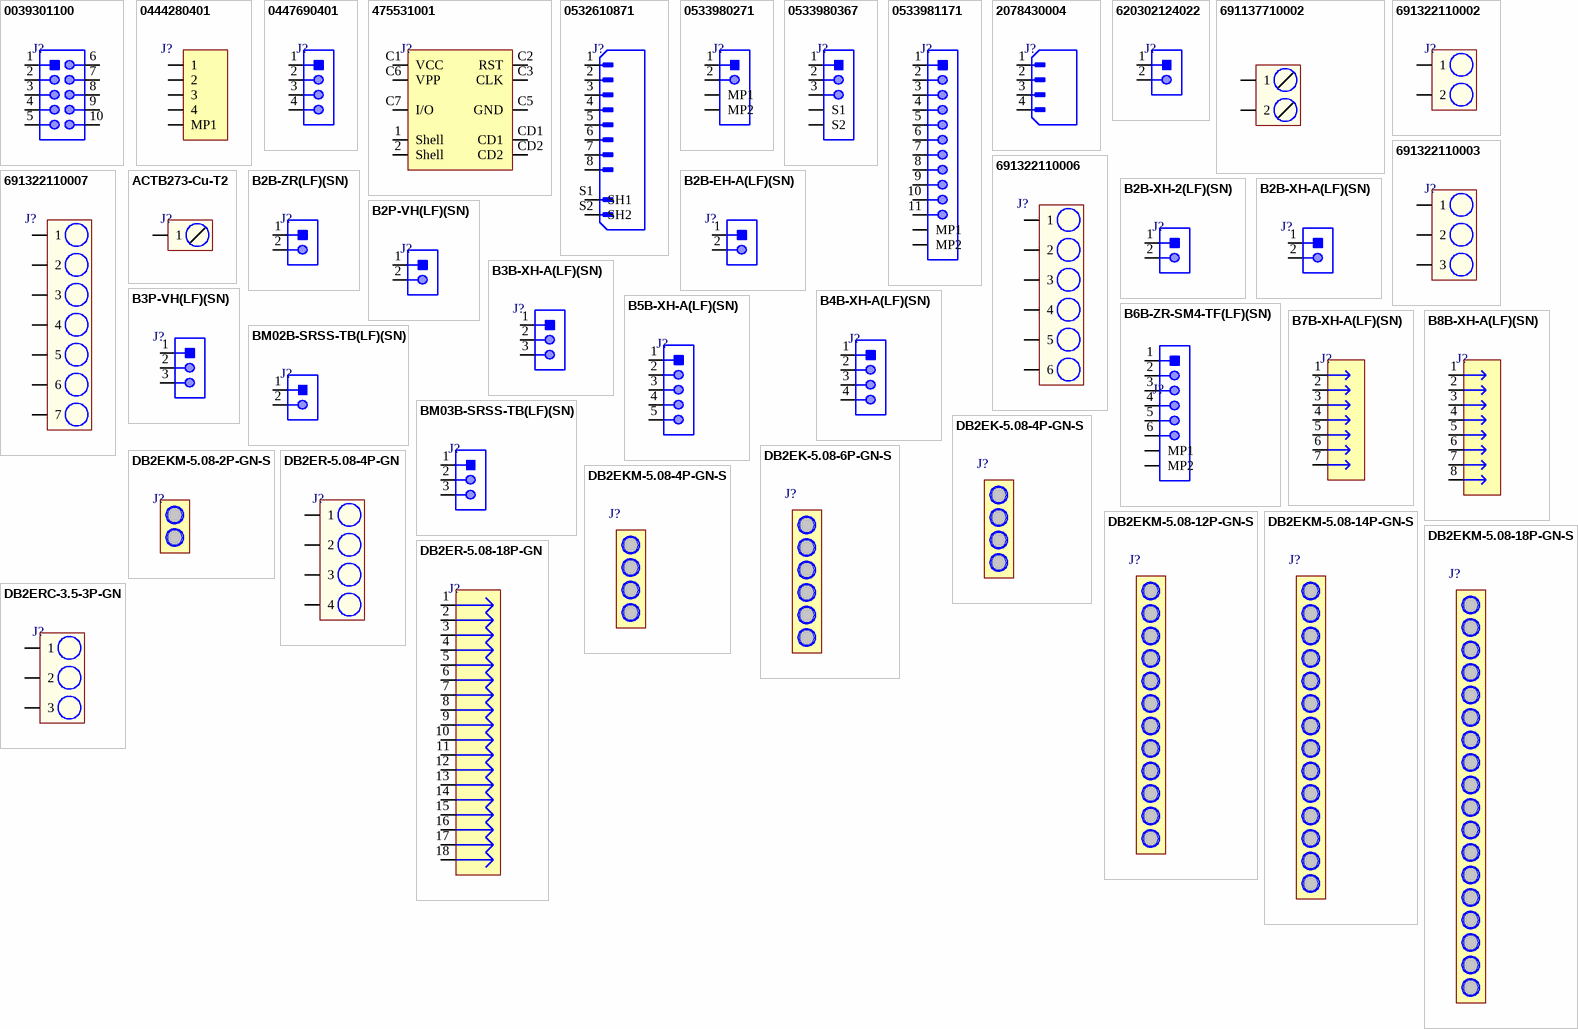
[diagram p1: symbols 0039301100 to DB2ERC-3.5-3P-GN]

## 0039301100
designator J?
CONN HEADER R/A 10POS 4.2MM; Manufacturer: Molex; Manufacturer Part Number: 0039301100; Item Type: Wire To Board Connector; Supplier: Mouser; Supplier Part Number: 538-39-30-1100; RoHS: Yes; Stock: 6491; Pricing: 1=1.3, 10=1.06, 50=1.06, 100=0.929, 1000=0.864, 10000=0.724 (USD); ComponentLink1URL: http://components.arrow.com/part/dataview/4710462S3155547N3303?src-supplier=Arrow+Electronics; ComponentLink1Description: http://components.arrow.com/part/dataview/4710462S3155547N3303?src-supplier=Arrow+Electronics; ComponentLink2URL: https://datasheet.octopart.com/39-30-1100-Molex-datasheet-143353.pdf?src-supplier=Digikey; ComponentLink2Description: https://datasheet.octopart.com/39-30-1100-Molex-datasheet-143353.pdf?src-supplier=Digikey; ComponentLink3URL: http://www.molex.com/webdocs/datasheets/pdf/en-us/0039301100_PCB_HEADERS.pdf?src-supplier=Avnet; ComponentLink3Description: http://www.molex.com/webdocs/datasheets/pdf/en-us/0039301100_PCB_HEADERS.pdf?src-supplier=Avnet; LCSC Part Number: C504987
footprint 0039301100
pins: 1, 2, 3, 4, 5, 6, 7, 8, 9, 10

## 0444280401
designator J?
CONN HEADER R/A 4POS 3MM; Manufacturer: Molex; Manufacturer Part Number: 0444280401; Item Type: Connector; Supplier: Digikey; Supplier Part Number: 23-0444280401-ND; RoHS: Yes; Stock: 7960; Pricing: 1=1.73, 10=1.47, 80=1.21413, 945=1.12499 (USD); ComponentLink1URL: https://datasheet.ciiva.com/3119/0444280401-pcb-headers-3119509.pdf?src-supplier=Avnet; ComponentLink1Description: https://datasheet.ciiva.com/3119/0444280401-pcb-headers-3119509.pdf?src-supplier=Avnet; LCSC Part Number: C17645517; ComponentLink2Description: LCSC; ComponentLink2URL: https://www.lcsc.com/product-detail/Wire-To-Board-Connector_MOLEX-0444280401_C17645517.html
footprint 0444280401-
pins: 1, 2, 3, 4, MP1

## 0447690401
designator J?
CONN HDR RCPT 4POS VERT TIN PCB; Manufacturer: Molex; Manufacturer Part Number: 0447690401; Item Type: Female Socket; Supplier: Mouser; Supplier Part Number: 538-44769-0401; RoHS: Yes; Stock: 4246; Pricing: 1=1.49, 10=1.31, 50=1.31, 100=1.31, 1000=1.28, 10000=1.27 (USD); ComponentLink1URL: https://datasheet.ciiva.com/3119/0447690401-pcb-receptacles-3119547.pdf?src-supplier=Avnet; ComponentLink1Description: https://datasheet.ciiva.com/3119/0447690401-pcb-receptacles-3119547.pdf?src-supplier=Avnet
footprint 0447690401
pins: 1, 2, 3, 4

## 475531001
designator J?
CONN SIM CARD PUSH-PUSH R/A SMD; Manufacturer: Molex; Manufacturer Part Number: 47553-1001; Number of Contacts: 6; Current Rating: 500mA; Voltage Rating (DC): 50V; Gender: Female; Pitch: 2.54mm; Item Type: SIM Card Connector; Supplier 1: Mouser; RoHS: Yes; Category: Memory Connectors; Stock 1: 16316; Pricing 1: 1=3.44000, 10=3.03000, 50=3.03000, 100=2.40000, 1000=2.36000, 10000=1.95000 (USD); Mounting Technology: Surface Mount; Contact Material: Copper,Copper Alloy; Contact Plating: Gold; Housing Material: Thermoplastic; Material: Thermoplastic; Min Operating Temperature: -30°C; Max Operating Temperature: 85°C; Packaging: Tape and Reel; Number of Rows: 1; Orientation: Horizontal; Termination: SMD/SMT; Series: 47553; Package Quantity: 1200; Number of Circuits: 6; Length: 26.5mm; Width: 19.35mm; Depth: 2.34mm; Radiation Hardening: No; RoHS Compliant: Yes; Reach SVHC Compliant: Unknown; ComponentLink1URL: https://datasheet.ciiva.com/1100/301162-1100082.pdf?src-supplier=Element14; ComponentLink1Description: https://datasheet.ciiva.com/1100/301162-1100082.pdf?src-supplier=Element14; ComponentLink2URL: https://datasheet.ciiva.com/4581/0475531001-memory-card-socket-146294-4581284.pdf?src-supplier=Mouser; ComponentLink2Description: https://datasheet.ciiva.com/4581/0475531001-memory-card-socket-146294-4581284.pdf?src-supplier=Mouser; ComponentLink3URL: https://datasheet.ciiva.com/9464/0475531001-memory-card-socket-9464188.pdf?src-supplier=Avnet; ComponentLink3Description: https://datasheet.ciiva.com/9464/0475531001-memory-card-socket-9464188.pdf?src-supplier=Avnet; ComponentLink4URL: https://datasheet.ciiva.com/16655/0475531001-memory-card-socket-16655597.pdf?; ComponentLink4Description: https://datasheet.ciiva.com/16655/0475531001-memory-card-socket-16655597.pdf?; Supplier Part Number 1: 538-47553-1001; LCSC Part Number: C293570
footprint 475531001
pins: 1 Shell, 2 Shell, C1 VCC, C2 RST, C3 CLK, C5 GND, C6 VPP, C7 I/O, CD1, CD2